# Altium footprint library 轻触开关.PcbLib: 62 footprints (part 2 of 4)
Each footprint in its own frame and in the unit in brackets; x right, y up, seen from the top. Pads: shape width x height; smd on the part's side, far side on the other; paste and mask are expansions set on the pad; w line width, h text height; cw(c..) or ccw(c..) is an arc to the next point about the centre after c.
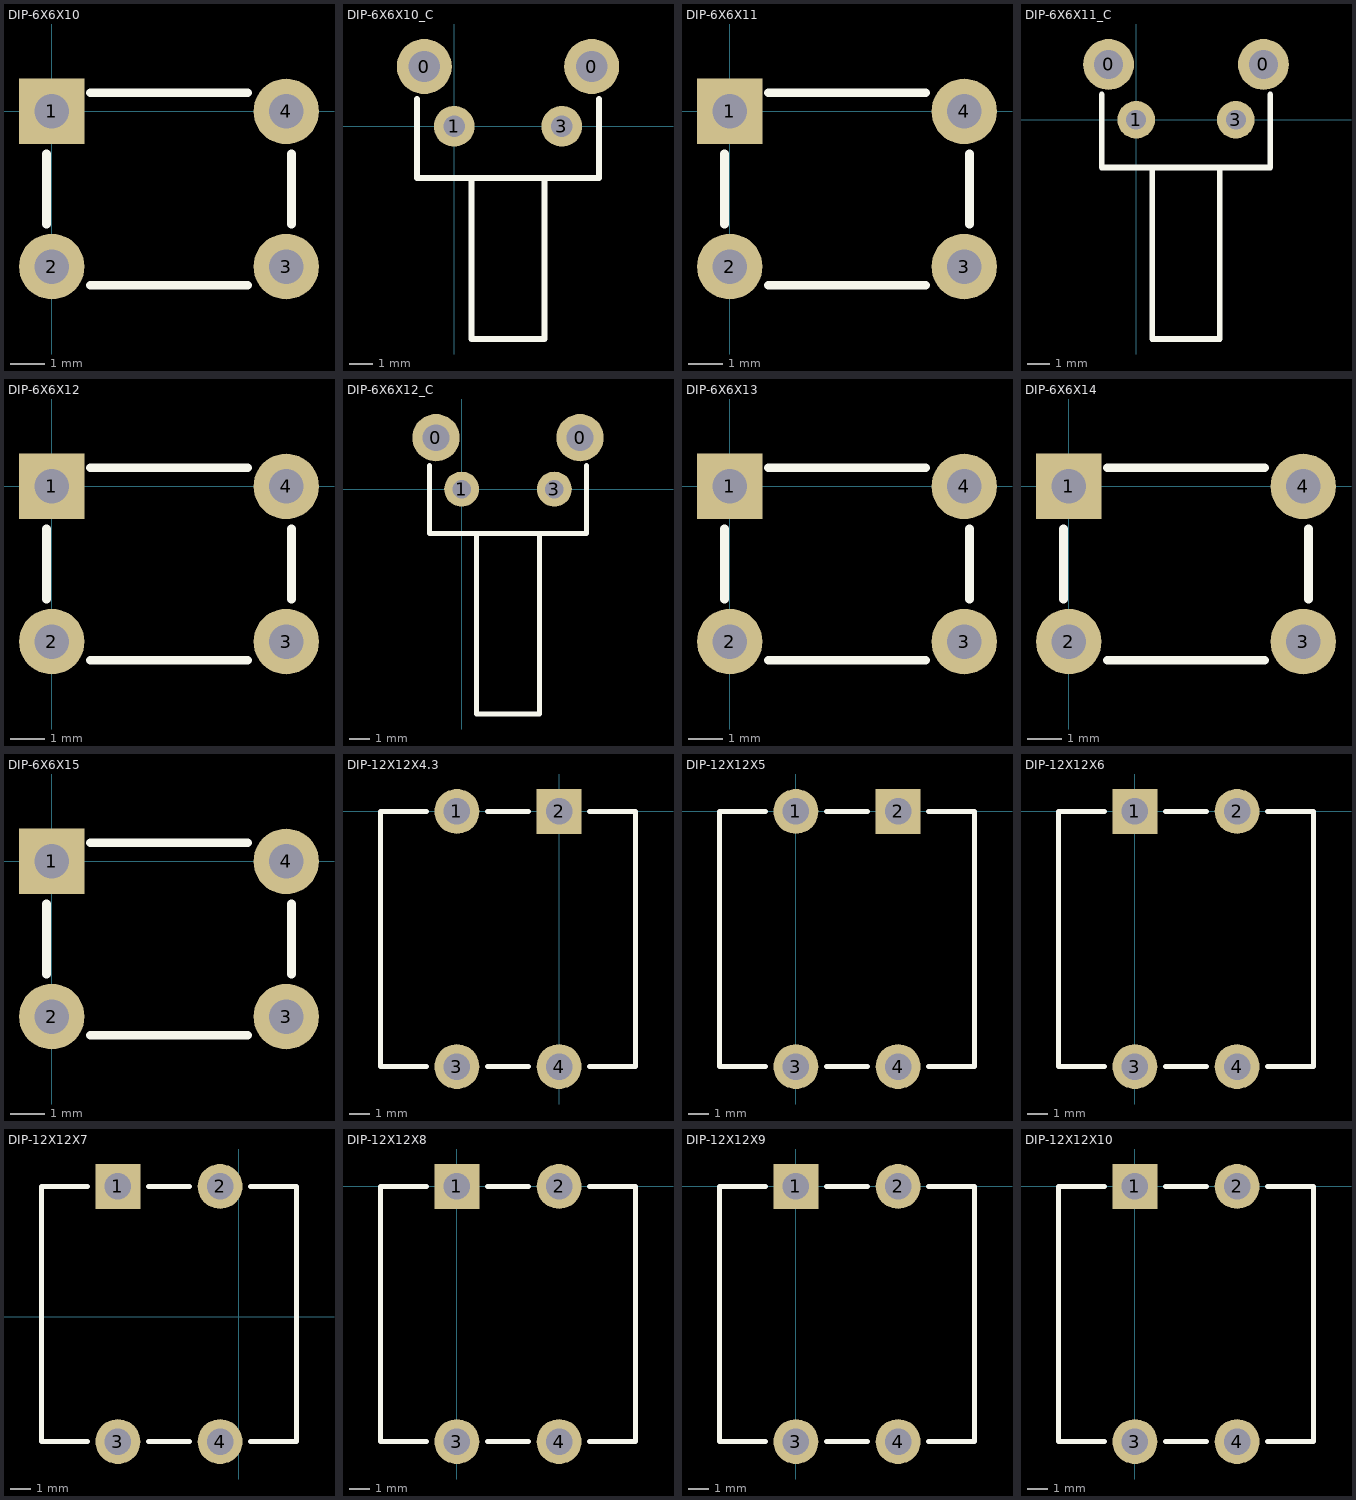
[diagram p1: the footprints below, top view; thin cyan lines are the x and y axes]

## DIP-6X6X10 [mm]
pads (4):
  rect 1.9x1.9 hole 1: 1(0,0)
  round 1.9 hole 1: 2(0,-4.5) 3(6.8,-4.5) 4(6.8,0)
Top Overlay:
  lines w0.254: -0.156,-3.266 -0.156,-1.234 ; 1.114,-5.044 5.686,-5.044 ; 1.114,0.544 5.686,0.544 ; 6.956,-3.266 6.956,-1.234
3D body "DIP-6X6X10.STEP": height 9.95, standoff -3.45, extent -0.677,-5.238 7.535,0.762

## DIP-6X6X10_C [mm]
pads (4):
  round 2.3 hole 1.3: 0(-1.25,2.5) 0(5.75,2.5)
  round 1.7 hole 0.9: 1(0,0) 3(4.5,0)
Top Overlay:
  lines w0.254: -1.56,1.143 -1.56,-2.159 6.06,-2.159 6.06,1.143 ; 0.726,-2.159 0.726,-8.89 3.774,-8.89 3.774,-2.159
3D body "DIP-6X6X10_V.STEP": height 7.47, standoff -3.4, extent -1.89,-8.838 6.477,4.012

## DIP-6X6X11 [mm]
pads (4):
  rect 1.9x1.9 hole 1: 1(0,0)
  round 1.9 hole 1: 2(0,-4.5) 3(6.8,-4.5) 4(6.8,0)
Top Overlay:
  lines w0.254: -0.156,-3.266 -0.156,-1.234 ; 1.114,-5.044 5.686,-5.044 ; 1.114,0.544 5.686,0.544 ; 6.956,-3.266 6.956,-1.234
3D body "DIP-6X6X11.STEP": height 10.95, standoff -3.45, extent -0.804,-5.207 7.408,0.793

## DIP-6X6X11_C [mm]
pads (4):
  round 2.3 hole 1.3: 0(-1.25,2.5) 0(5.75,2.5)
  round 1.7 hole 0.9: 1(0,0) 3(4.5,0)
Top Overlay:
  lines w0.254: -1.56,1.143 -1.56,-2.159 6.06,-2.159 6.06,1.143 ; 0.726,-2.159 0.726,-9.906 3.774,-9.906 3.774,-2.159
3D body "DIP-6X6X11_V.STEP": height 7.47, standoff -3.4, extent -1.898,-9.786 6.47,4.064

## DIP-6X6X12 [mm]
pads (4):
  rect 1.9x1.9 hole 1: 1(0,0)
  round 1.9 hole 1: 2(0,-4.5) 3(6.8,-4.5) 4(6.8,0)
Top Overlay:
  lines w0.254: -0.156,-3.266 -0.156,-1.234 ; 1.114,-5.044 5.686,-5.044 ; 1.114,0.544 5.686,0.544 ; 6.956,-3.266 6.956,-1.234
3D body "DIP-6X6X12.STEP": height 11.95, standoff -3.45, extent -0.677,-5.238 7.535,0.762

## DIP-6X6X12_C [mm]
pads (4):
  round 2.3 hole 1.3: 0(-1.25,2.5) 0(5.75,2.5)
  round 1.7 hole 0.9: 1(0,0) 3(4.5,0)
Top Overlay:
  lines w0.254: -1.56,1.143 -1.56,-2.159 6.06,-2.159 6.06,1.143 ; 0.726,-2.159 0.726,-10.922 3.774,-10.922 3.774,-2.159
3D body "DIP-6X6X12_V.STEP": height 7.47, standoff -3.4, extent -1.898,-10.786 6.47,4.064

## DIP-6X6X13 [mm]
pads (4):
  rect 1.9x1.9 hole 1: 1(0,0)
  round 1.9 hole 1: 2(0,-4.5) 3(6.8,-4.5) 4(6.8,0)
Top Overlay:
  lines w0.254: -0.156,-3.266 -0.156,-1.234 ; 1.114,-5.044 5.686,-5.044 ; 1.114,0.544 5.686,0.544 ; 6.956,-3.266 6.956,-1.234
3D body "DIP-6X6X13.STEP": height 12.95, standoff -3.45, extent -0.55,-5.207 7.662,0.793

## DIP-6X6X14 [mm] "6*6*14mm"
pads (4):
  rect 1.9x1.9 hole 1: 1(0,0)
  round 1.9 hole 1: 2(0,-4.5) 3(6.8,-4.5) 4(6.8,0)
Top Overlay:
  lines w0.254: -0.156,-3.266 -0.156,-1.234 ; 1.114,-5.044 5.686,-5.044 ; 1.114,0.544 5.686,0.544 ; 6.956,-3.266 6.956,-1.234
3D body "DIP-6X6X14.STEP": height 13.95, standoff -3.45, extent -0.55,-5.207 7.662,0.793

## DIP-6X6X15 [mm]
pads (4):
  rect 1.9x1.9 hole 1: 1(0,0)
  round 1.9 hole 1: 2(0,-4.5) 3(6.8,-4.5) 4(6.8,0)
Top Overlay:
  lines w0.254: -0.156,-3.266 -0.156,-1.234 ; 1.114,-5.044 5.686,-5.044 ; 1.114,0.544 5.686,0.544 ; 6.956,-3.266 6.956,-1.234
3D body "DIP-6X6X15.STEP": height 14.95, standoff -3.45, extent -0.677,-5.334 7.535,0.666

## DIP-12X12X4.3 [mm]
pads (4):
  round 2.2 hole 1.3: 1(-5,0) 3(-5,-12.5) 4(0,-12.5)
  rect 2.2x2.2 hole 1.3: 2(0,0)
Top Overlay:
  lines w0.254: -6.5,-12.5 -8.75,-12.5 -8.75,0 -6.5,0 ; -3.5,-12.5 -1.5,-12.5 ; -3.5,0 -1.5,0 ; 1.5,-12.5 3.75,-12.5 3.75,0 1.5,0
3D body "DIP-12X12X4.3.STEP": height 4.45, standoff -3.35, extent -8.54,-13.081 3.46,0.716

## DIP-12X12X5 [mm]
pads (4):
  round 2.2 hole 1.3: 1(0,0) 3(0,-12.5) 4(5,-12.5)
  rect 2.2x2.2 hole 1.3: 2(5,0)
Top Overlay:
  lines w0.254: -1.5,-12.5 -3.75,-12.5 -3.75,0 -1.5,0 ; 1.5,-12.5 3.5,-12.5 ; 1.5,0 3.5,0 ; 6.5,-12.5 8.75,-12.5 8.75,0 6.5,0
3D body "DIP-12X12X5.STEP": height 5.15, standoff -3.35, extent -3.46,-13.162 8.54,0.635

## DIP-12X12X6 [mm]
pads (4):
  rect 2.2x2.2 hole 1.3: 1(0,0)
  round 2.2 hole 1.3: 2(5,0) 3(0,-12.5) 4(5,-12.5)
Top Overlay:
  lines w0.254: -1.5,-12.5 -3.75,-12.5 -3.75,0 -1.5,0 ; 1.5,-12.5 3.5,-12.5 ; 1.5,0 3.5,0 ; 6.5,-12.5 8.75,-12.5 8.75,0 6.5,0
3D body "DIP-12X12X6.STEP": height 6.15, standoff -3.35, extent -3.46,-13.289 8.54,0.508

## DIP-12X12X7 [mm] "12*12*7mm"
pads (4):
  rect 2.2x2.2 hole 1.3: 1(-5.929,6.377)
  round 2.2 hole 1.3: 2(-0.929,6.377) 3(-5.929,-6.123) 4(-0.929,-6.123)
Top Overlay:
  lines w0.254: -7.429,-6.123 -9.679,-6.123 -9.679,6.377 -7.429,6.377 ; -4.429,-6.123 -2.429,-6.123 ; -4.429,6.377 -2.429,6.377 ; 0.571,-6.123 2.821,-6.123 2.821,6.377 0.571,6.377
3D body "DIP-12X12X7.STEP": height 7.15, standoff -3.35, extent -9.429,-6.685 2.571,7.112

## DIP-12X12X8 [mm]
pads (4):
  rect 2.2x2.2 hole 1.3: 1(0,0)
  round 2.2 hole 1.3: 2(5,0) 3(0,-12.5) 4(5,-12.5)
Top Overlay:
  lines w0.254: -1.5,-12.5 -3.75,-12.5 -3.75,0 -1.5,0 ; 1.5,-12.5 3.5,-12.5 ; 1.5,0 3.5,0 ; 6.5,-12.5 8.75,-12.5 8.75,0 6.5,0
3D body "DIP-12X12X8.STEP": height 8.15, standoff -3.35, extent -3.46,-13.081 8.54,0.716

## DIP-12X12X9 [mm]
pads (4):
  rect 2.2x2.2 hole 1.3: 1(0,0)
  round 2.2 hole 1.3: 2(5,0) 3(0,-12.5) 4(5,-12.5)
Top Overlay:
  lines w0.254: -1.5,-12.5 -3.75,-12.5 -3.75,0 -1.5,0 ; 1.5,-12.5 3.5,-12.5 ; 1.5,0 3.5,0 ; 6.5,-12.5 8.75,-12.5 8.75,0 6.5,0
3D body "DIP-12X12X9.STEP": height 9.15, standoff -3.35, extent -3.46,-13.289 8.54,0.508

## DIP-12X12X10 [mm]
pads (4):
  rect 2.2x2.2 hole 1.3: 1(0,0)
  round 2.2 hole 1.3: 2(5,0) 3(0,-12.5) 4(5,-12.5)
Top Overlay:
  lines w0.254: -1.5,-12.5 -3.75,-12.5 -3.75,0 -1.5,0 ; 1.5,-12.5 3.5,-12.5 ; 1.5,0 3.5,0 ; 6.5,-12.5 8.75,-12.5 8.75,0 6.5,0
3D body "DIP-12X12X10.STEP": height 10.15, standoff -3.35, extent -3.46,-13.289 8.54,0.508